# Altium footprint library Footprint.PcbLib: 411 footprints (part 25 of 26)
Each footprint in its own frame and in the unit in brackets; x right, y up, seen from the top. Pads: shape width x height; smd on the part's side, far side on the other; paste and mask are expansions set on the pad; w line width, h text height; cw(c..) or ccw(c..) is an arc to the next point about the centre after c.
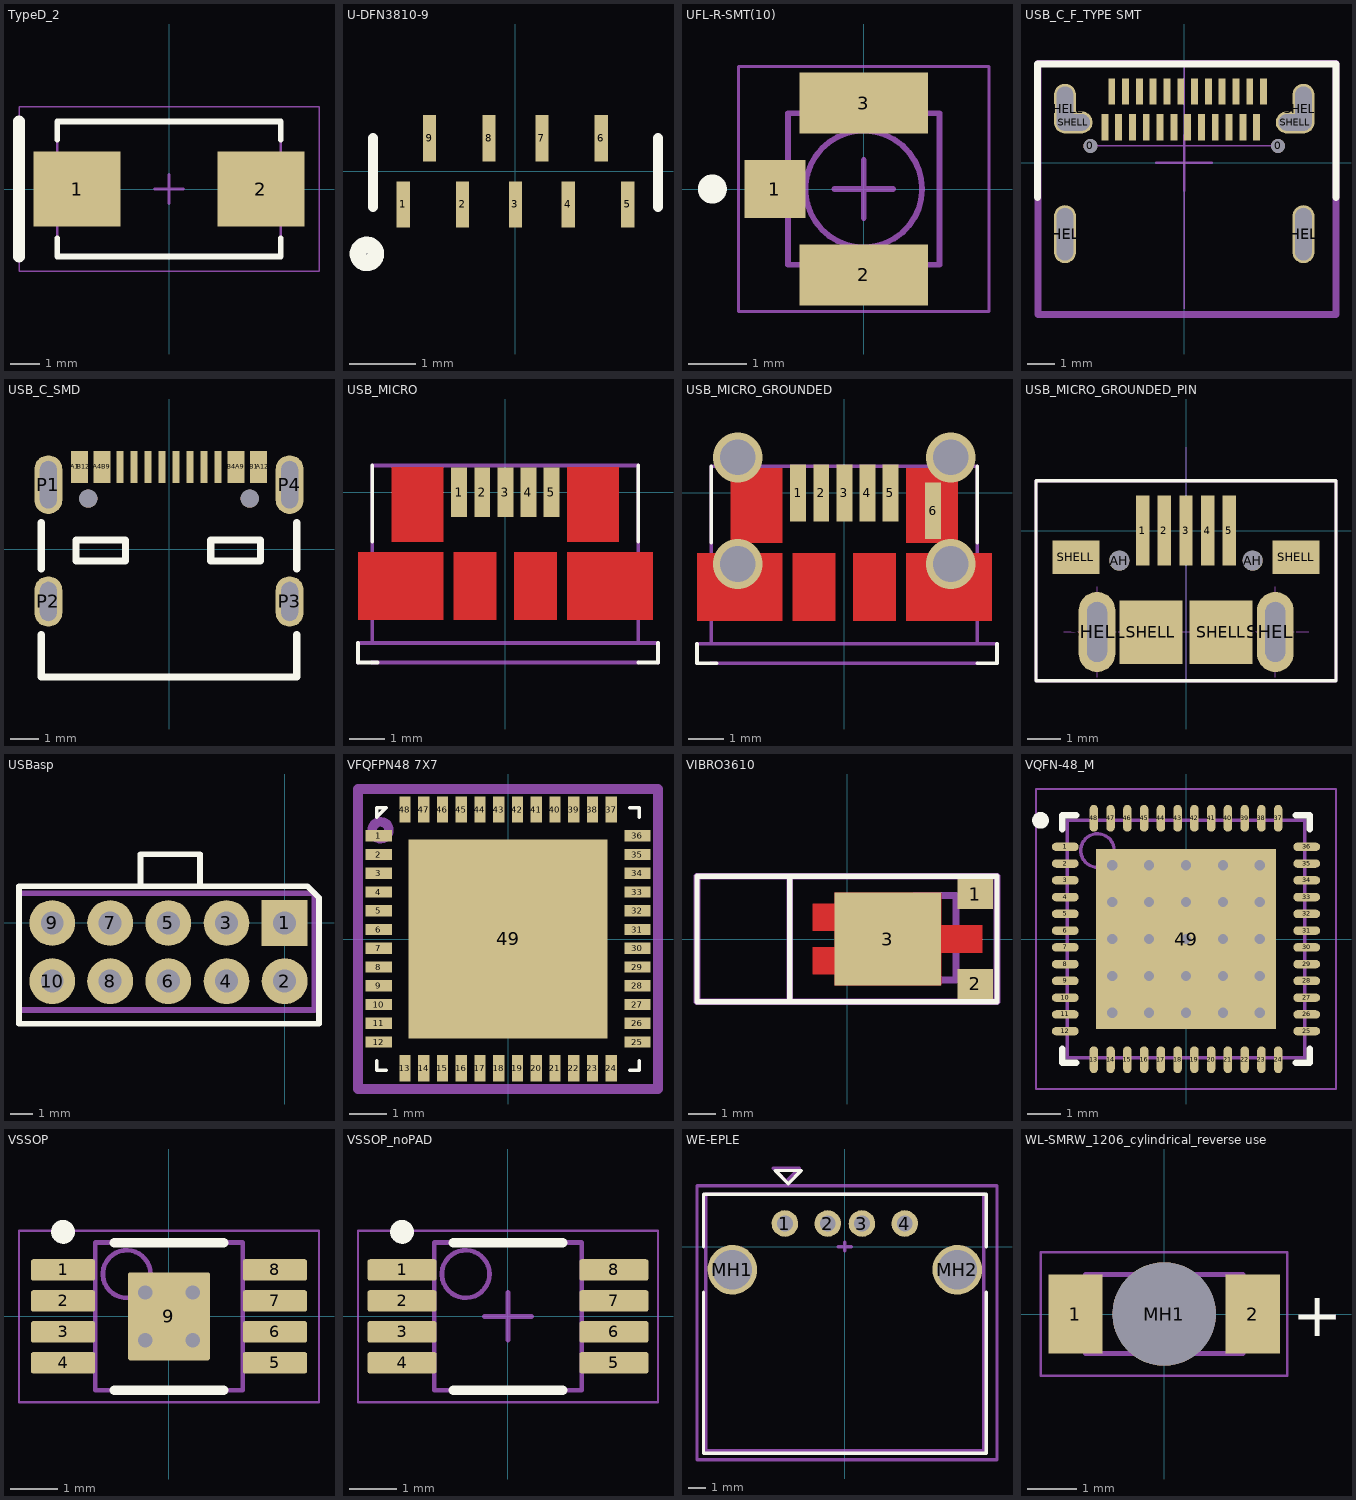
[diagram p24: the footprints below, top view; thin cyan lines are the x and y axes]

## TypeD_2 [mm] "Molded Capacitor, 2-Leads, Body 7.60x4.60mm, IPC Low Density"
height 3.1
pads (2):
  rect 2.95x2.55 smd: 1(-3.125,0) 2(3.125,0)
Top Overlay:
  lines w0.2: -3.8,-1.675 -3.8,-2.3 3.8,-2.3 3.8,-1.675 ; -3.8,1.675 -3.8,2.3 3.8,2.3 3.8,1.675
  lines w0.4: -5.1,-2.3 -5.1,2.3
Mechanical 13:
  lines w0.1: -3.8,-2.3 3.8,-2.3 3.8,2.3 -3.8,2.3 -3.8,-2.3
Mechanical 15:
  lines w0.05: -5.1,-2.8 5.1,-2.8 5.1,2.8 -5.1,2.8 -5.1,-2.8
  lines w0.1: -0.5,0 0.5,0 ; 0,-0.5 0,0.5
3D body "T491D476M006AT.step": height 3.1, standoff 0, extent -3.8,-2.3 3.8,2.3

## U-DFN3810-9 [mm]
pads (9):
  rect 0.2x0.7 smd: 1(-1.7,-0.5) 2(-0.8,-0.5) 3(0,-0.5) 4(0.8,-0.5) 5(1.7,-0.5) 6(1.3,0.5) 7(0.4,0.5) 8(-0.4,0.5) 9(-1.3,0.5)
Top Overlay:
  circle w0.254: c-2.25,-1.25 r0.135
  lines w0.15: -2.159,-0.542 -2.159,0.508 ; 2.159,-0.542 2.159,0.508
3D body: height 0.55, standoff 0, extent -1.925,-0.525 1.925,0.525

## UFL-R-SMT(10) [mm] "Connector, 3-Leads, Body 2.6x2.6mm"
height 1.25
pads (3):
  rect 1.05x1 smd: 1(-1.525,0)
  rect 2.2x1.05 smd: 2(0,-1.475) 3(0,1.475)
Top Overlay:
  circle w0.25: c-2.6,0 r0.125
Mechanical 13:
  circle w0.1: c0,0 r1
  lines w0.1: -1.3,-1.3 1.3,-1.3 1.3,1.3 -1.3,1.3 -1.3,-1.3
Mechanical 15:
  lines w0.05: -2.15,-2.1 -2.15,2.1 2.15,2.1 2.15,-2.1 -2.15,-2.1
  lines w0.1: -0.5,0 0.5,0 ; 0,-0.5 0,0.5
3D body: height 1.25, standoff 0, extent -0.999,-1 0.999,0.999
3D body: height 0.35, standoff 0, extent -1.3,-1.3 1.3,1.3

## USB_C_F_TYPE SMT [mm]
pads (32):
  round 0.5 hole 0.5 unplated: 0(-3.4,0.613) 0(3.4,0.613)
  rect 0.25x0.95 smd: A1(-2.625,2.588) A2(-2.125,2.588) A3(-1.625,2.588) A4(-1.125,2.588) A5(-0.625,2.588) A6(-0.125,2.588) A7(0.375,2.588) A8(0.875,2.588) A9(1.375,2.588) A10(1.875,2.588) A11(2.375,2.588) A12(2.875,2.588) B1(2.625,1.288) B2(2.125,1.288) B3(1.625,1.288) B4(1.125,1.288) B5(0.625,1.288) B6(0.125,1.288) B7(-0.375,1.288) B8(-0.875,1.288) B9(-1.375,1.288) B10(-1.875,1.288) B11(-2.375,1.288) B12(-2.875,1.288)
  oval 0.8x2.1 hole 0.6 slot 1.9 at 90 deg: SHELL(-4.32,-2.588) SHELL(4.32,-2.588)
  oval 0.8x1.8 hole 0.6 slot 1.6 at 90 deg: SHELL(-4.32,1.963) SHELL(4.32,1.963)
  oval 1.4x0.8 hole 0.6 slot 1.2 at 0 deg: SHELL(-4.02,1.463) SHELL(4.02,1.463)
Top Overlay:
  lines w0.254: -5.32,-1.25 -5.32,3.587 5.5,3.587 5.5,-1.25
Top Paste:
  region: -4.75,1.5 -4.752,1.413 -4.69,1.25 -4.571,1.124 -4.412,1.052 -4.325,1.05 -3.68,1.05 -3.586,1.058 -3.424,1.153 -3.317,1.307 -3.286,1.492 -3.336,1.672 -3.457,1.815 -3.628,1.893 -3.815,1.891 -3.9,1.85 -3.9,2.5 -3.9,2.58 -3.961,2.727 -4.073,2.839 -4.22,2.9 -4.3,2.9 -4.385,2.905 -4.545,2.85 -4.671,2.737 -4.745,2.585 -4.75,2.5
  region: 4.75,1.5 4.752,1.413 4.69,1.25 4.571,1.124 4.412,1.052 4.325,1.05 3.68,1.05 3.586,1.058 3.424,1.153 3.317,1.307 3.286,1.492 3.336,1.672 3.457,1.815 3.628,1.893 3.815,1.891 3.9,1.85 3.9,2.5 3.9,2.58 3.961,2.727 4.073,2.839 4.22,2.9 4.3,2.9 4.385,2.905 4.545,2.85 4.671,2.737 4.745,2.585 4.75,2.5
  region: 3.9,-3.25 3.9,-3.33 3.961,-3.477 4.073,-3.589 4.22,-3.65 4.3,-3.65 4.35,-3.65 4.43,-3.65 4.577,-3.589 4.689,-3.477 4.75,-3.33 4.75,-3.25 4.75,-1.95 4.75,-1.865 4.685,-1.709 4.566,-1.59 4.41,-1.525 4.325,-1.525 4.24,-1.525 4.084,-1.59 3.965,-1.709 3.9,-1.865 3.9,-1.95
  region: -4.74,-3.25 -4.74,-3.33 -4.679,-3.477 -4.567,-3.589 -4.42,-3.65 -4.34,-3.65 -4.29,-3.65 -4.21,-3.65 -4.063,-3.589 -3.951,-3.477 -3.89,-3.33 -3.89,-3.25 -3.89,-1.95 -3.89,-1.865 -3.955,-1.709 -4.074,-1.59 -4.23,-1.525 -4.315,-1.525 -4.4,-1.525 -4.556,-1.59 -4.675,-1.709 -4.74,-1.865 -4.74,-1.95
Mechanical 3:
  lines w0.05: -3.4,0.613 3.4,0.613 ; 0,-5.288 0,3.587
Mechanical 15:
  lines w0.1: -1,0 1,0 ; 0,-1 0,1
  lines w0.254: -5.3,-5.5 5.5,-5.5 5.5,3.6 -5.3,3.6 -5.3,-5.5
  text ".Designator" at -3.2,4 h1.52

## USB_C_SMD [mm]
pads (22):
  rect 0.3x1.15 smd: A1(-3.362,2.95) A4(-2.562,2.95) A9(2.538,2.95) A12(3.338,2.95) B1(3.038,2.95) B4(2.238,2.95) B9(-2.262,2.95) B12(-3.062,2.95)
  rect 0.25x1.15 smd: A5(-1.261,2.95) A6(-0.261,2.95) A7(0.238,2.95) A8(1.238,2.95) B5(1.739,2.95) B6(0.739,2.95) B7(-0.762,2.95) B8(-1.762,2.95)
  oval 1x2.1 hole 0.6 slot 1.7 at 90 deg: P1(-4.332,2.315) P4(4.308,2.315)
  oval 1x1.8 hole 0.6 slot 1.4 at 90 deg: P2(-4.332,-1.865) P3(4.308,-1.865)
  round 0.65 hole 0.65 unplated: ""(-2.902,1.815) ""(2.878,1.815)
Top Overlay:
  lines w0.254: -4.584,-3.048 -4.584,-4.572 4.56,-4.572 4.56,-3.048 ; -4.584,-0.699 -4.584,0.952 ; 4.56,-0.699 4.56,0.952 ; -3.341,-0.422 -1.563,-0.422 -1.563,0.34 -3.341,0.34 -3.341,-0.422 ; 1.485,-0.422 3.263,-0.422 3.263,0.34 1.485,0.34 1.485,-0.422
3D body "User Library-12_type-c_female_16pin_asm(1)(1).STEP": height 3.33, standoff -1.02, extent -4.463,-4.432 4.477,3.148

## USB_MICRO [mm]
pads (5):
  rect 0.45x1.4 smd: 1(-1.3,0) 2(-0.65,0) 3(0,0) 4(0.65,0) 5(1.3,0)
Top Layer:
  region: 1.75,-3.6 4.15,-3.6 4.15,-1.7 1.75,-1.7
  region: 0.25,-3.6 1.45,-3.6 1.45,-1.7 0.25,-1.7
  region: -1.75,-1.7 -4.15,-1.7 -4.15,-3.6 -1.75,-3.6
  region: -0.25,-1.7 -1.45,-1.7 -1.45,-3.6 -0.25,-3.6
  region: 1.75,-1.4 3.2,-1.4 3.2,0.7 1.75,0.7
  region: -1.75,0.7 -3.2,0.7 -3.2,-1.4 -1.75,-1.4
Top Overlay:
  lines w0.1: -4.15,-4.25 -4.15,-4.8 -3.6,-4.8 ; -3.75,-1.4 -3.75,0.75 ; 3.75,-4.8 4.3,-4.8 4.3,-4.25 ; 3.75,-1.4 3.75,0.75
Top Paste:
  region: 1.85,-1.8 1.85,-3.5 4.05,-3.5 4.05,-1.8
  region: 0.35,-3.5 1.35,-3.5 1.35,-1.8 0.35,-1.8
  region: -4.05,-1.8 -4.05,-3.5 -1.85,-3.5 -1.85,-1.8
  region: -0.35,-1.8 -1.35,-1.8 -1.35,-3.5 -0.35,-3.5
  region: 1.85,-1.3 3.1,-1.3 3.1,0.6 1.85,0.6
  region: -1.85,0.6 -3.1,0.6 -3.1,-1.3 -1.85,-1.3
Top Solder:
  region: 1.85,-1.8 1.85,-3.5 4.05,-3.5 4.05,-1.8
  region: 0.35,-3.5 1.35,-3.5 1.35,-1.8 0.35,-1.8
  region: -4.05,-1.8 -4.05,-3.5 -1.85,-3.5 -1.85,-1.8
  region: -0.35,-1.8 -1.35,-1.8 -1.35,-3.5 -0.35,-3.5
  region: 1.85,-1.3 3.1,-1.3 3.1,0.6 1.85,0.6
  region: -1.85,0.6 -3.1,0.6 -3.1,-1.3 -1.85,-1.3
Mechanical 1:
  lines w0.1: -3.75,-4.8 3.75,-4.8 ; -3.75,-4.25 -3.75,0.75 3.75,0.75 3.75,-4.25 ; 4.3,-4.8 4.3,-4.25 -4.15,-4.25 ; -4.15,-4.25 -4.15,-4.8 -4.15,-4.25

## USB_MICRO_GROUNDED [mm]
pads (6):
  rect 0.45x1.6 smd: 1(-1.3,0) 2(-0.65,0) 3(0,0) 4(0.65,0) 5(1.3,0) 6(2.5,-0.5)
via 3,1 diameter 1.4 hole 1
via 3,-2 diameter 1.4 hole 1
via -3,1 diameter 1.4 hole 1
via -3,-2 diameter 1.4 hole 1
Top Layer:
  region: 1.75,-1.4 3.2,-1.4 3.2,0.7 1.75,0.7
  region: -1.75,0.7 -3.2,0.7 -3.2,-1.4 -1.75,-1.4
  region: 1.75,-3.6 4.15,-3.6 4.15,-1.7 1.75,-1.7
  region: 0.25,-3.6 1.45,-3.6 1.45,-1.7 0.25,-1.7
  region: -1.75,-1.7 -4.15,-1.7 -4.15,-3.6 -1.75,-3.6
  region: -0.25,-1.7 -1.45,-1.7 -1.45,-3.6 -0.25,-3.6
Top Overlay:
  lines w0.1: -4.15,-4.25 -4.15,-4.8 -3.6,-4.8 ; -3.75,-1.4 -3.75,0.75 ; 3.75,-4.8 4.3,-4.8 4.3,-4.25 ; 3.75,-1.4 3.75,0.75
Top Paste:
  region: 1.85,-1.3 3.1,-1.3 3.1,0.6 1.85,0.6
  region: -1.85,0.6 -3.1,0.6 -3.1,-1.3 -1.85,-1.3
  region: 1.85,-1.8 1.85,-3.5 4.05,-3.5 4.05,-1.8
  region: 0.35,-3.5 1.35,-3.5 1.35,-1.8 0.35,-1.8
  region: -4.05,-1.8 -4.05,-3.5 -1.85,-3.5 -1.85,-1.8
  region: -0.35,-1.8 -1.35,-1.8 -1.35,-3.5 -0.35,-3.5
Top Solder:
  region: 1.85,-1.3 3.1,-1.3 3.1,0.6 1.85,0.6
  region: -1.85,0.6 -3.1,0.6 -3.1,-1.3 -1.85,-1.3
  region: 1.85,-1.8 1.85,-3.5 4.05,-3.5 4.05,-1.8
  region: 0.35,-3.5 1.35,-3.5 1.35,-1.8 0.35,-1.8
  region: -4.05,-1.8 -4.05,-3.5 -1.85,-3.5 -1.85,-1.8
  region: -0.35,-1.8 -1.35,-1.8 -1.35,-3.5 -0.35,-3.5
Mechanical 1:
  lines w0.1: -3.75,-4.8 3.75,-4.8 ; -3.75,-4.25 -3.75,0.75 3.75,0.75 3.75,-4.25 ; 4.3,-4.8 4.3,-4.25 -4.15,-4.25 ; -4.15,-4.25 -4.15,-4.8 -4.15,-4.25

## USB_MICRO_GROUNDED_PIN [mm]
pads (13):
  rect 0.4x2.1 smd: 1(-1.3,0) 2(-0.65,0) 3(0,0) 4(0.65,0) 5(1.3,0)
  round 0.6 hole 0.6 unplated: AH(-2,-0.9) AH(2,-0.9)
  rect 1.4x1 smd: SHELL(-3.3,-0.8) SHELL(3.3,-0.8)
  oval 1.1x2.4 hole 0.6 slot 1.8 at 90 deg: SHELL(-2.67,-3.04) SHELL(2.68,-3.04)
  rect 1.9x1.9 smd: SHELL(-1.05,-3.05) SHELL(1.05,-3.05)
Top Overlay:
  lines w0.1: -4.5,-4.5 4.5,-4.5 4.5,1.5 -4.5,1.5 -4.5,-4.5
Mechanical 3:
  lines w0.01: -3.67,-3.04 3.68,-3.04 ; -2.67,-4.4 -2.67,-1.69 ; 0,-4.5 0,2.5 ; 2.68,-4.4 2.68,-1.69
Mechanical 15:
  lines w0.1: -4.5,-4.5 -4.5,1.5 4.5,1.5 4.5,-4.5 -4.5,-4.5
  text ".Designator" at -2.25,-1.25 h1.52
3D body "User Library-3057-51550001R-Rev_01.step": height 2.77, standoff -0.17, extent -4.75,-5.48 4.75,0.46

## USBasp [mm]
pads (10):
  rect 2x2 hole 1: 1(0,0)
  round 2 hole 1: 2(0,-2.54) 3(-2.54,0) 4(-2.54,-2.54) 5(-5.08,0) 6(-5.08,-2.54) 7(-7.62,0) 8(-7.62,-2.54) 9(-10.15,0) 10(-10.15,-2.54)
Top Overlay:
  lines w0.254: -6.3,1.6 -6.3,3 -3.7,3 -3.7,1.6 ; -11.6,-4.4 1.5,-4.4 1.5,1.1 1,1.6 -11.6,1.6 -11.6,-4.4
Mechanical 15:
  circle w0.254: c0,0 r0.1
  lines w0.254: -11.6,-3.8 -11.6,1.3 1.3,1.3 1.3,-3.8 -11.6,-3.8
  text ".Designator" at -11.2,1.6 h1.52
3D body "User Library-BH-10___64.step": height 8.84, standoff -3.3, extent -15.26,-6.025 5.1,3.175

## VFQFPN48 7X7 [mm]
pads (49):
  rect 0.7x0.3 smd: 1(-3.45,2.75) 2(-3.45,2.25) 3(-3.45,1.75) 4(-3.45,1.25) 5(-3.45,0.75) 6(-3.45,0.25) 7(-3.45,-0.25) 8(-3.45,-0.75) 9(-3.45,-1.25) 10(-3.45,-1.75) 11(-3.45,-2.25) 12(-3.45,-2.75) 25(3.45,-2.75) 26(3.45,-2.25) 27(3.45,-1.75) 28(3.45,-1.25) 29(3.45,-0.75) 30(3.45,-0.25) 31(3.45,0.25) 32(3.45,0.75) 33(3.45,1.25) 34(3.45,1.75) 35(3.45,2.25) 36(3.45,2.75)
  rect 0.3x0.7 smd: 13(-2.75,-3.45) 14(-2.25,-3.45) 15(-1.75,-3.45) 16(-1.25,-3.45) 17(-0.75,-3.45) 18(-0.25,-3.45) 19(0.25,-3.45) 20(0.75,-3.45) 21(1.25,-3.45) 22(1.75,-3.45) 23(2.25,-3.45) 24(2.75,-3.45) 37(2.75,3.45) 38(2.25,3.45) 39(1.75,3.45) 40(1.25,3.45) 41(0.75,3.45) 42(0.25,3.45) 43(-0.25,3.45) 44(-0.75,3.45) 45(-1.25,3.45) 46(-1.75,3.45) 47(-2.25,3.45) 48(-2.75,3.45)
  rect 5.3x5.3 smd: 49(0,0)
Top Overlay:
  lines w0.1: -3.5,-3.25 -3.5,-3.5 -3.25,-3.5 ; 3.25,-3.5 3.5,-3.5 3.5,-3.25 ; 3.25,3.5 3.5,3.5 3.5,3.25 ; -3.5,3.25 -3.5,3.5 -3.25,3.5 -3.5,3.25
Mechanical 15:
  circle w0.254: c-3.4,2.9 r0.224
  lines w0.254: -4,-4 4,-4 4,4 -4,4 -4,-4
  text ".Designator" at -3,4.2 h1.52

## VIBRO3610 [mm]
pads (3):
  rect 1.3x1.1 smd: 1(4.7,1.65) 2(4.7,-1.65)
  rect 3.9x3.4 smd paste-25.4 mask-25.4: 3(1.5,0)
Top Layer:
  region: -0.45,-1.7 3.45,-1.7 3.45,-0.5 4.95,-0.5 4.95,0.5 3.45,0.5 3.45,1.7 -0.45,1.7 -0.45,1.3 -1.25,1.3 -1.25,0.3 -0.45,0.3 -0.45,-0.3 -1.25,-0.3 -1.25,-1.3 -0.45,-1.3
Top Overlay:
  lines w0.2: -2.1,-2.3 -2.1,2.3 ; -5.5,-2.3 5.5,-2.3 5.5,2.3 -5.5,2.3 -5.5,-2.3
Top Paste:
  region: -0.45,-1.7 3.45,-1.7 3.45,-0.5 4.95,-0.5 4.95,0.5 3.45,0.5 3.45,1.7 -0.45,1.7 -0.45,1.3 -1.25,1.3 -1.25,0.3 -0.45,0.3 -0.45,-0.3 -1.25,-0.3 -1.25,-1.3 -0.45,-1.3
Top Solder:
  region: -0.45,-1.7 3.45,-1.7 3.45,-0.5 4.95,-0.5 4.95,0.5 3.45,0.5 3.45,1.7 -0.45,1.7 -0.45,1.3 -1.25,1.3 -1.25,0.3 -0.45,0.3 -0.45,-0.3 -1.25,-0.3 -1.25,-1.3 -0.45,-1.3
Mechanical 15:
  lines w0.254: -2.1,-2.2 -2.1,2.3 ; -0.254,0 0.254,0 ; 0,-0.254 0,0.254 ; 2.5,1.6 4,1.6 4,-1.5 2.7,-1.5 ; -5.5,-2.3 -5.5,2.3 5.5,2.3 5.5,-2.3 -5.5,-2.3
  text ".Designator" at -2,2.6 h1.52
3D body "User Library-z30c1t8219651.step": height 3.59, standoff 0, extent -5.05,-2.096 5.75,2.196

## VQFN-48_M [mm] "QFN, 48-Leads, Body 7.08x7.08mm, Pitch 0.5mm, Thermal Pad 5.36x5.36mm, IPC Low Density"
height 1
pads (49):
  oval 0.8x0.25 smd: 1(-3.6,2.75) 2(-3.6,2.25) 3(-3.6,1.75) 4(-3.6,1.25) 5(-3.6,0.75) 6(-3.6,0.25) 7(-3.6,-0.25) 8(-3.6,-0.75) 9(-3.6,-1.25) 10(-3.6,-1.75) 11(-3.6,-2.25) 12(-3.6,-2.75) 25(3.6,-2.75) 26(3.6,-2.25) 27(3.6,-1.75) 28(3.6,-1.25) 29(3.6,-0.75) 30(3.6,-0.25) 31(3.6,0.25) 32(3.6,0.75) 33(3.6,1.25) 34(3.6,1.75) 35(3.6,2.25) 36(3.6,2.75)
  oval 0.25x0.8 smd: 13(-2.75,-3.6) 14(-2.25,-3.6) 15(-1.75,-3.6) 16(-1.25,-3.6) 17(-0.75,-3.6) 18(-0.25,-3.6) 19(0.25,-3.6) 20(0.75,-3.6) 21(1.25,-3.6) 22(1.75,-3.6) 23(2.25,-3.6) 24(2.75,-3.6) 37(2.75,3.6) 38(2.25,3.6) 39(1.75,3.6) 40(1.25,3.6) 41(0.75,3.6) 42(0.25,3.6) 43(-0.25,3.6) 44(-0.75,3.6) 45(-1.25,3.6) 46(-1.75,3.6) 47(-2.25,3.6) 48(-2.75,3.6)
  rect 5.36x5.36 smd: 49(0,0)
via -2.2,2.2 diameter 0.6 hole 0.3
via -1.1,2.2 diameter 0.6 hole 0.3
via 0,2.2 diameter 0.6 hole 0.3
via 1.1,2.2 diameter 0.6 hole 0.3
via 2.2,2.2 diameter 0.6 hole 0.3
via -2.2,1.1 diameter 0.6 hole 0.3
via -1.1,1.1 diameter 0.6 hole 0.3
via 0,1.1 diameter 0.6 hole 0.3
via 1.1,1.1 diameter 0.6 hole 0.3
via 2.2,1.1 diameter 0.6 hole 0.3
via -2.2,0 diameter 0.6 hole 0.3
via -1.1,0 diameter 0.6 hole 0.3
via 0,0 diameter 0.6 hole 0.3
via 1.1,0 diameter 0.6 hole 0.3
via 2.2,0 diameter 0.6 hole 0.3
via -2.2,-1.1 diameter 0.6 hole 0.3
via -1.1,-1.1 diameter 0.6 hole 0.3
via 0,-1.1 diameter 0.6 hole 0.3
via 1.1,-1.1 diameter 0.6 hole 0.3
via 2.2,-1.1 diameter 0.6 hole 0.3
via -2.2,-2.2 diameter 0.6 hole 0.3
via -1.1,-2.2 diameter 0.6 hole 0.3
via 0,-2.2 diameter 0.6 hole 0.3
via 1.1,-2.2 diameter 0.6 hole 0.3
via 2.2,-2.2 diameter 0.6 hole 0.3
Top Overlay:
  circle w0.25: c-4.34,3.54 r0.125
  lines w0.2: -3.69,-3.275 -3.69,-3.69 -3.275,-3.69 ; -3.69,3.275 -3.69,3.69 -3.275,3.69 ; 3.275,-3.69 3.69,-3.69 3.69,-3.275 ; 3.275,3.69 3.69,3.69 3.69,3.275
Mechanical 13:
  circle w0.1: c-2.64,2.64 r0.5
  lines w0.1: -3.54,-3.54 -3.54,3.54 3.54,3.54 3.54,-3.54 -3.54,-3.54
Mechanical 15:
  lines w0.05: -4.475,-4.475 -4.475,4.475 4.475,4.475 4.475,-4.475 -4.475,-4.475
  lines w0.1: -0.5,0 0.5,0 ; 0,-0.5 0,0.5
3D body: height 1, standoff 0, extent -3.54,-3.54 3.54,3.54

## VSSOP [mm] "TSOP, 8-Leads, Body 3.1x3.1mm, Pitch 0.65mm, Thermal Pad 1.85x1.73mm, IPC Medium Density"
height 1.1
pads (9):
  rrect22% 1.35x0.45 smd: 1(-2.225,0.975) 2(-2.225,0.325) 3(-2.225,-0.325) 4(-2.225,-0.975) 5(2.225,-0.975) 6(2.225,-0.325) 7(2.225,0.325) 8(2.225,0.975)
  rrect6% 1.73x1.85 smd: 9(0,0)
via 0.5,-0.5 diameter 0.6 hole 0.3
via -0.5,-0.5 diameter 0.6 hole 0.3
via 0.5,0.5 diameter 0.6 hole 0.3
via -0.5,0.5 diameter 0.6 hole 0.3
Top Overlay:
  circle w0.25: c-2.225,1.775 r0.125
  lines w0.2: -1.15,-1.55 1.15,-1.55 ; -1.15,1.55 1.15,1.55
Mechanical 1:
  text ".Designator" at -1.397,-0.254 h0.7
Mechanical 13:
  circle w0.1: c-0.889,0.889 r0.5
  lines w0.1: -1.55,-1.55 1.55,-1.55 1.55,1.55 -1.55,1.55 -1.55,-1.55
Mechanical 15:
  lines w0.05: -3.15,-1.8 3.15,-1.8 3.15,1.8 -3.15,1.8 -3.15,-1.8
  lines w0.1: -0.5,0 0.5,0 ; 0,-0.5 0,0.5
3D body "MUY08A_ASM.stp": height 0.94, standoff -0.02, extent -2.451,-1.499 2.451,1.499

## VSSOP_noPAD [mm] "TSOP, 8-Leads, Body 3.1x3.1mm, Pitch 0.65mm, Thermal Pad 1.85x1.73mm, IPC Medium Density"
height 1.1
pads (8):
  rrect22% 1.45x0.45 smd: 1(-2.225,0.975) 2(-2.225,0.325) 3(-2.225,-0.325) 4(-2.225,-0.975) 5(2.225,-0.975) 6(2.225,-0.325) 7(2.225,0.325) 8(2.225,0.975)
Top Overlay:
  circle w0.25: c-2.225,1.775 r0.125
  lines w0.2: -1.15,-1.55 1.15,-1.55 ; -1.15,1.55 1.15,1.55
Mechanical 1:
  text ".Designator" at -1.397,-0.254 h0.7
Mechanical 13:
  circle w0.1: c-0.889,0.889 r0.5
  lines w0.1: -1.55,-1.55 1.55,-1.55 1.55,1.55 -1.55,1.55 -1.55,-1.55
Mechanical 15:
  lines w0.05: -3.15,-1.8 3.15,-1.8 3.15,1.8 -3.15,1.8 -3.15,-1.8
  lines w0.1: -0.5,0 0.5,0 ; 0,-0.5 0,0.5
3D body "MUY08A_ASM.stp": height 0.94, standoff -0.02, extent -2.451,-1.499 2.451,1.499

## WE-EPLE [mm] "THT, USB 2.0 A Connector, 4Pin, Body 15.8 x14.5mm"
height 7.12
pads (6):
  round 1.55 hole 0.92: 1(-3.5,1.35) 2(-1,1.35) 3(1,1.35) 4(3.5,1.35)
  round 2.9 hole 2.3: MH1(-6.57,-1.35) MH2(6.57,-1.35)
Top Overlay:
  lines w0.2: -8.255,-2.667 -8.255,-12.065 8.255,-12.065 8.255,-2.667 ; -8.255,0 -8.255,3.048 8.255,3.048 8.255,0 ; -4.064,4.445 -3.302,3.683 -2.54,4.445 -4.064,4.445
Mechanical 13:
  lines w0.2: -8.128,-11.938 -8.128,3.048 8.128,3.048 8.128,-11.938 -8.128,-11.938
Mechanical 15:
  lines w0.2: -0.381,0 0.381,0 ; 0,-0.254 0,0.254 ; -8.636,-12.446 -8.636,3.556 8.89,3.556 8.89,-12.446 -8.636,-12.446 ; -4.191,4.572 -2.667,4.572 -3.429,3.81 -4.191,4.572
  text ".Designator" at 0,0 h0.76
3D body "WE-EPLE_8492121_1.stp": height 7.8, standoff -3.49, extent -7.892,-11.698 7.873,2.802

## WL-SMRW_1206_cylindrical_reverse use [mm] "SMD Mono-color Reverse mount LED, body 3.2x1.2mm"
height 0.4
pads (3):
  rect 1.1x1.6 smd: 1(-1.8,0) 2(1.8,0)
  round 2.1 hole 2.1 unplated: MH1(0,0)
Top Overlay:
  text "+" at 2.6,-0.45 h0.89
Mechanical 13:
  region: 0.8,0.55 0.8,-0.5 -0.15,-0.5 -0.15,-0.2 -0.75,-0.2 -0.75,0.2 -0.15,0.2 -0.15,0.55
  lines w0.1: -1.6,-0.8 1.6,-0.8 1.6,0.8 -1.6,0.8 -1.6,-0.8
Mechanical 15:
  lines w0.05: -0.5,0 0.5,0 ; 0,-0.5 0,0.5 ; -2.5,-1.25 -2.5,1.25 2.5,1.25 2.5,-1.25 -2.5,-1.25
3D body "WL-SMRW_1206_cylindrical.stp": height 0.4, standoff -0.8, extent -1.6,-0.8 1.6,0.8